# Altium schematic symbol library MCP73831T-2ATI_OT.SchLib: 1 symbol
Pins are listed as number, name and electrical type; pins without a type are passive.

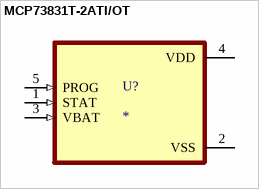
[diagram p0: symbol MCP73831T-2ATI/OT]

## MCP73831T-2ATI/OT
designator U?
Microchip MCP73831T-2ATI/OT, Battery Charge Controller, 500mA, 5-Pin SOT-23 | Microchip Technology Inc. MCP73831T-2ATI/OT; SnapEDA_Link: https://www.snapeda.com/parts/MCP73831T-2ATI/OT/Microchip/view-part/?ref=snap; Package: SOT-23 Microchip; Value: *; MF: Microchip; MP: MCP73831T-2ATI/OT; Check_prices: https://www.snapeda.com/parts/MCP73831T-2ATI/OT/Microchip/view-part/?ref=eda
footprint SOT95P280X145-5N
pins: 1 STAT (in), 2 VSS (power), 3 VBAT (in), 4 VDD (power), 5 PROG (in)